# Altium footprint library WR-PHD_Socket Header.PcbLib: 279 footprints (part 10 of 18)
Each footprint in its own frame and in the unit in brackets; x right, y up, seen from the top. Pads: shape width x height; smd on the part's side, far side on the other; paste and mask are expansions set on the pad; w line width, h text height; cw(c..) or ccw(c..) is an arc to the next point about the centre after c.
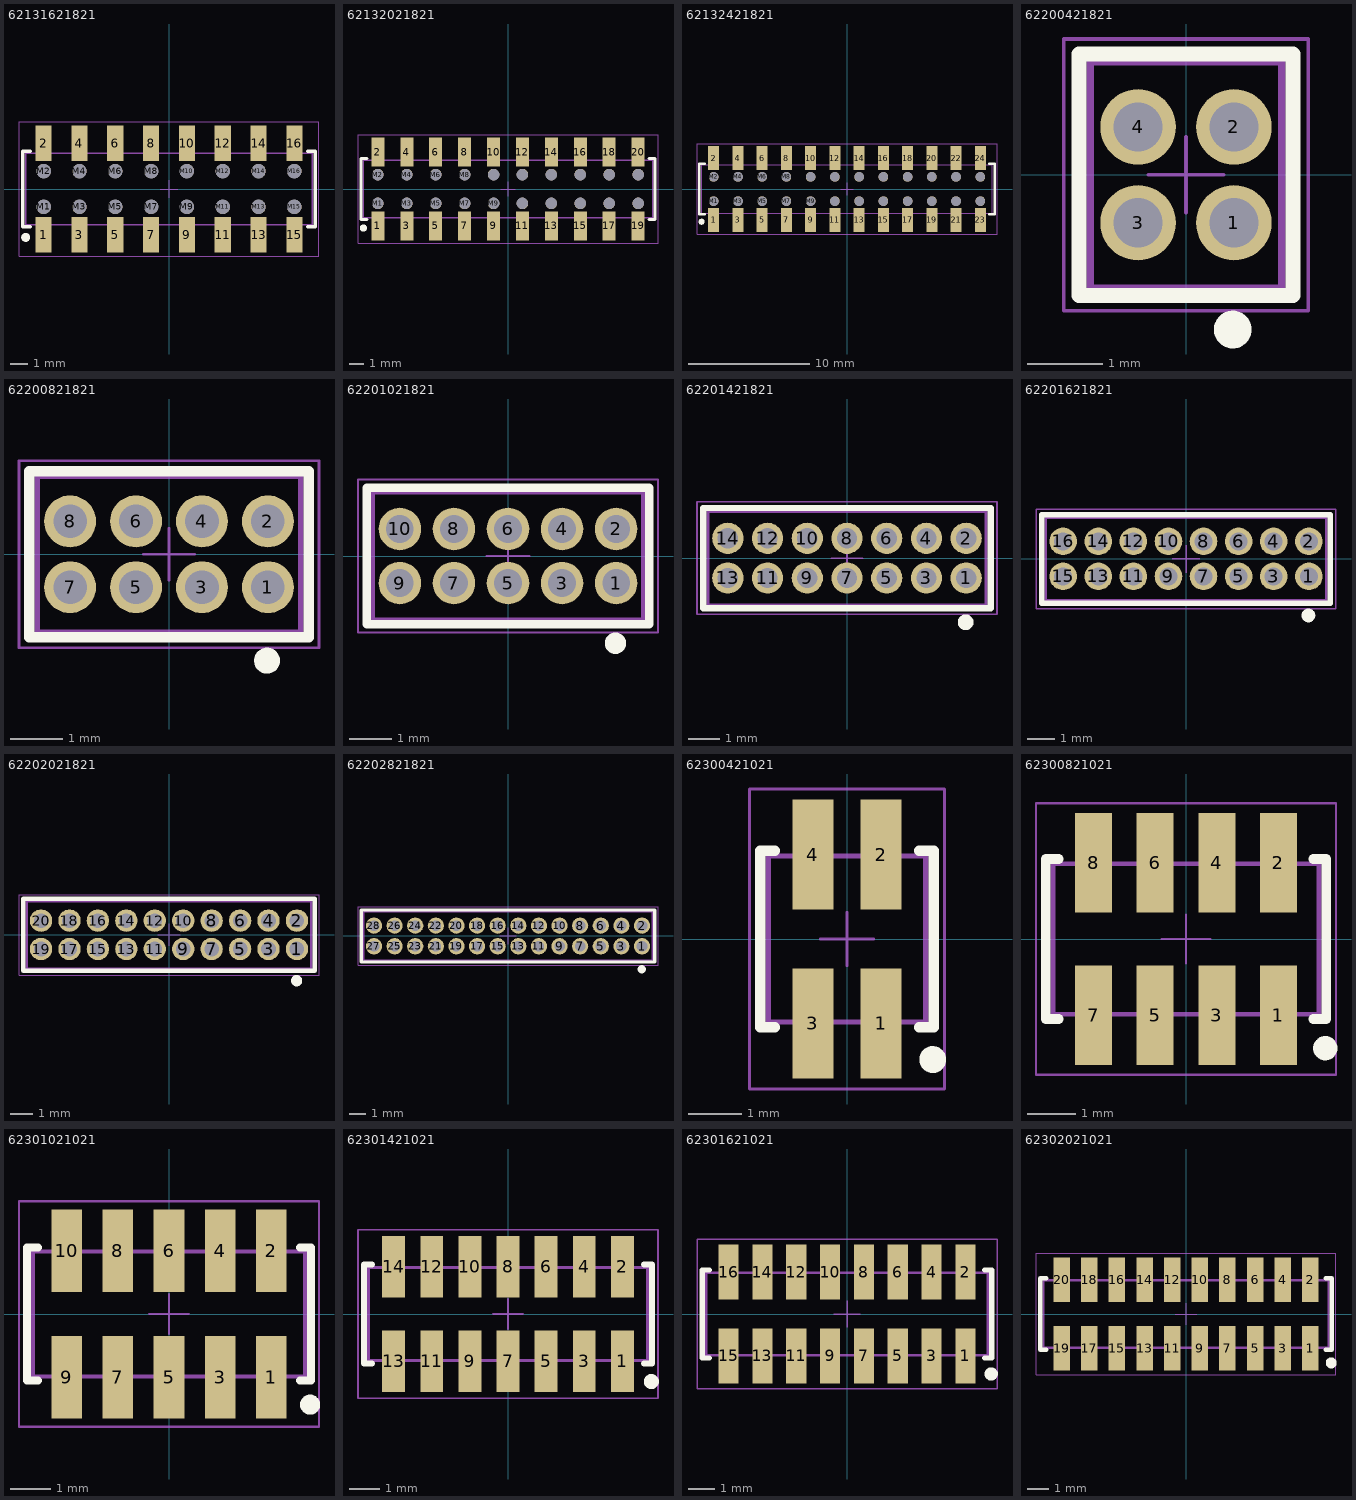
[diagram p9: the footprints below, top view; thin cyan lines are the x and y axes]

## 62131621821 [mm] "Socket Header, Pitch 2.00 mm, SMT, Vertical, dual row, 16p"
height 2.35
pads (32):
  rect 0.9x2 smd: 1(-7,-2.55) 2(-7,2.55) 3(-5,-2.55) 4(-5,2.55) 5(-3,-2.55) 6(-3,2.55) 7(-1,-2.55) 8(-1,2.55) 9(1,-2.55) 10(1,2.55) 11(3,-2.55) 12(3,2.55) 13(5,-2.55) 14(5,2.55) 15(7,-2.55) 16(7,2.55)
  round 0.8 hole 0.8 unplated: M1(-7,-1) M2(-7,1) M3(-5,-1) M4(-5,1) M5(-3,-1) M6(-3,1) M7(-1,-1) M8(-1,1) M9(1,-1) M10(1,1) M11(3,-1) M12(3,1) M13(5,-1) M14(5,1) M15(7,-1) M16(7,1)
Top Overlay:
  circle w0.25: c-8,-2.7 r0.125
  lines w0.2: -7.75,-2.1 -8.175,-2.1 -8.175,2.1 -7.75,2.1 ; 7.75,-2.1 8.175,-2.1 8.175,2.1 7.75,2.1
Top Designator:
  text ".Designator" at -4.998,-0.333 h1
Top Component Outline:
  lines w0.1: -7.25,-2 -7.25,-3 -6.75,-3 -6.75,-2 ; -7.25,2 -7.25,3 -6.75,3 -6.75,2 ; -5.25,-2 -5.25,-3 -4.75,-3 -4.75,-2 ; -5.25,2 -5.25,3 -4.75,3 -4.75,2 ; -3.25,-2 -3.25,-3 -2.75,-3 -2.75,-2 ; -3.25,2 -3.25,3 -2.75,3 -2.75,2 ; -1.25,-2 -1.25,-3 -0.75,-3 -0.75,-2 ; -1.25,2 -1.25,3 -0.75,3 -0.75,2 ; 0.75,-2 0.75,-3 1.25,-3 1.25,-2 ; 0.75,2 0.75,3 1.25,3 1.25,2 ; 2.75,-2 2.75,-3 3.25,-3 3.25,-2 ; 2.75,2 2.75,3 3.25,3 3.25,2 ; 4.75,-2 4.75,-3 5.25,-3 5.25,-2 ; 4.75,2 4.75,3 5.25,3 5.25,2 ; 6.75,-2 6.75,-3 7.25,-3 7.25,-2 ; 6.75,2 6.75,3 7.25,3 7.25,2 ; -8,-2 8,-2 8,2 -8,2 -8,-2
Top Courtyard:
  lines w0.05: -8.375,-3.75 8.375,-3.75 8.375,3.75 -8.375,3.75 -8.375,-3.75
Top Component Center:
  lines w0.05: -0.5,0 0.5,0 ; 0,-0.5 0,0.5
3D body "62131621821.stp": height 2.95, standoff 0, extent -8,-3 8,3

## 62132021821 [mm] "Socket Header, Pitch 2.00 mm, SMT, Vertical, dual row, 20p"
height 2.35
pads (40):
  rect 0.9x2 smd: 1(-9,-2.55) 2(-9,2.55) 3(-7,-2.55) 4(-7,2.55) 5(-5,-2.55) 6(-5,2.55) 7(-3,-2.55) 8(-3,2.55) 9(-1,-2.55) 10(-1,2.55) 11(1,-2.55) 12(1,2.55) 13(3,-2.55) 14(3,2.55) 15(5,-2.55) 16(5,2.55) 17(7,-2.55) 18(7,2.55) 19(9,-2.55) 20(9,2.55)
  round 0.8 hole 0.8 unplated: M1(-9,-1) M2(-9,1) M3(-7,-1) M4(-7,1) M5(-5,-1) M6(-5,1) M7(-3,-1) M8(-3,1) M9(-1,-1) M10(-1,1) M11(1,-1) M12(1,1) M13(3,-1) M14(3,1) M15(5,-1) M16(5,1) M17(7,-1) M18(7,1) M19(9,-1) M20(9,1)
Top Overlay:
  circle w0.25: c-10,-2.7 r0.125
  lines w0.2: -9.75,-2.1 -10.175,-2.1 -10.175,2.1 -9.75,2.1 ; 9.75,-2.1 10.175,-2.1 10.175,2.1 9.75,2.1
Top Designator:
  text ".Designator" at -4.998,-0.333 h1
Top Component Outline:
  lines w0.1: -9.25,-2 -9.25,-3 -8.75,-3 -8.75,-2 ; -9.25,2 -9.25,3 -8.75,3 -8.75,2 ; -7.25,-2 -7.25,-3 -6.75,-3 -6.75,-2 ; -7.25,2 -7.25,3 -6.75,3 -6.75,2 ; -5.25,-2 -5.25,-3 -4.75,-3 -4.75,-2 ; -5.25,2 -5.25,3 -4.75,3 -4.75,2 ; -3.25,-2 -3.25,-3 -2.75,-3 -2.75,-2 ; -3.25,2 -3.25,3 -2.75,3 -2.75,2 ; -1.25,-2 -1.25,-3 -0.75,-3 -0.75,-2 ; -1.25,2 -1.25,3 -0.75,3 -0.75,2 ; 0.75,-2 0.75,-3 1.25,-3 1.25,-2 ; 0.75,2 0.75,3 1.25,3 1.25,2 ; 2.75,-2 2.75,-3 3.25,-3 3.25,-2 ; 2.75,2 2.75,3 3.25,3 3.25,2 ; 4.75,-2 4.75,-3 5.25,-3 5.25,-2 ; 4.75,2 4.75,3 5.25,3 5.25,2 ; 6.75,-2 6.75,-3 7.25,-3 7.25,-2 ; 6.75,2 6.75,3 7.25,3 7.25,2 ; 8.75,-2 8.75,-3 9.25,-3 9.25,-2 ; 8.75,2 8.75,3 9.25,3 9.25,2 ; -10,-2 10,-2 10,2 -10,2 -10,-2
Top Courtyard:
  lines w0.05: -10.375,-3.75 10.375,-3.75 10.375,3.75 -10.375,3.75 -10.375,-3.75
Top Component Center:
  lines w0.05: -0.5,0 0.5,0 ; 0,-0.5 0,0.5
3D body "62132021821.stp": height 2.95, standoff 0, extent -10,-3 10,3

## 62132421821 [mm] "Socket Header, Pitch 2.00 mm, SMT, Vertical, dual row, 24p"
height 2.35
pads (48):
  rect 0.9x2 smd: 1(-11,-2.55) 2(-11,2.55) 3(-9,-2.55) 4(-9,2.55) 5(-7,-2.55) 6(-7,2.55) 7(-5,-2.55) 8(-5,2.55) 9(-3,-2.55) 10(-3,2.55) 11(-1,-2.55) 12(-1,2.55) 13(1,-2.55) 14(1,2.55) 15(3,-2.55) 16(3,2.55) 17(5,-2.55) 18(5,2.55) 19(7,-2.55) 20(7,2.55) 21(9,-2.55) 22(9,2.55) 23(11,-2.55) 24(11,2.55)
  round 0.8 hole 0.8 unplated: M1(-11,-1) M2(-11,1) M3(-9,-1) M4(-9,1) M5(-7,-1) M6(-7,1) M7(-5,-1) M8(-5,1) M9(-3,-1) M10(-3,1) M11(-1,-1) M12(-1,1) M13(1,-1) M14(1,1) M15(3,-1) M16(3,1) M17(5,-1) M18(5,1) M19(7,-1) M20(7,1) M21(9,-1) M22(9,1) M23(11,-1) M24(11,1)
Top Overlay:
  circle w0.25: c-12,-2.7 r0.125
  lines w0.2: -11.75,-2.1 -12.175,-2.1 -12.175,2.1 -11.75,2.1 ; 11.75,-2.1 12.175,-2.1 12.175,2.1 11.75,2.1
Top Designator:
  text ".Designator" at -4.998,-0.333 h1
Top Component Outline:
  lines w0.1: -11.25,-2 -11.25,-3 -10.75,-3 -10.75,-2 ; -11.25,2 -11.25,3 -10.75,3 -10.75,2 ; -9.25,-2 -9.25,-3 -8.75,-3 -8.75,-2 ; -9.25,2 -9.25,3 -8.75,3 -8.75,2 ; -7.25,-2 -7.25,-3 -6.75,-3 -6.75,-2 ; -7.25,2 -7.25,3 -6.75,3 -6.75,2 ; -5.25,-2 -5.25,-3 -4.75,-3 -4.75,-2 ; -5.25,2 -5.25,3 -4.75,3 -4.75,2 ; -3.25,-2 -3.25,-3 -2.75,-3 -2.75,-2 ; -3.25,2 -3.25,3 -2.75,3 -2.75,2 ; -1.25,-2 -1.25,-3 -0.75,-3 -0.75,-2 ; -1.25,2 -1.25,3 -0.75,3 -0.75,2 ; 0.75,-2 0.75,-3 1.25,-3 1.25,-2 ; 0.75,2 0.75,3 1.25,3 1.25,2 ; 2.75,-2 2.75,-3 3.25,-3 3.25,-2 ; 2.75,2 2.75,3 3.25,3 3.25,2 ; 4.75,-2 4.75,-3 5.25,-3 5.25,-2 ; 4.75,2 4.75,3 5.25,3 5.25,2 ; 6.75,-2 6.75,-3 7.25,-3 7.25,-2 ; 6.75,2 6.75,3 7.25,3 7.25,2 ; 8.75,-2 8.75,-3 9.25,-3 9.25,-2 ; 8.75,2 8.75,3 9.25,3 9.25,2 ; 10.75,-2 10.75,-3 11.25,-3 11.25,-2 ; 10.75,2 10.75,3 11.25,3 11.25,2 ; -12,-2 12,-2 12,2 -12,2 -12,-2
Top Courtyard:
  lines w0.05: -12.375,-3.75 12.375,-3.75 12.375,3.75 -12.375,3.75 -12.375,-3.75
Top Component Center:
  lines w0.05: -0.5,0 0.5,0 ; 0,-0.5 0,0.5
3D body "62132421821.stp": height 2.95, standoff 0, extent -12,-3 12,3

## 62200421821 [mm] "Socket Header, Pitch 1.27 mm, THT, Vertical, dual row, 4p"
height 4.65
pads (4):
  round 1 hole 0.65: 1(0.635,-0.635) 2(0.635,0.635) 3(-0.635,-0.635) 4(-0.635,0.635)
Top Overlay:
  circle w0.25: c0.62,-2.05 r0.125
  lines w0.2: -1.42,-1.6 -1.42,1.6 1.42,1.6 1.42,-1.6 -1.42,-1.6
Top Designator:
  text ".Designator" at -4.998,-0.333 h1
Top Component Outline:
  lines w0.1: -1.27,-1.5 1.27,-1.5 1.27,1.5 -1.27,1.5 -1.27,-1.5
Top Courtyard:
  lines w0.05: -1.62,-1.8 -1.62,1.8 1.62,1.8 1.62,-1.8 -1.62,-1.8
Top Component Center:
  lines w0.05: -0.5,0 0.5,0 ; 0,-0.5 0,0.5
3D body "62200421821.stp": height 4.55, standoff -2.15, extent -1.47,-1.5 1.47,1.5

## 62200821821 [mm] "Socket Header, Pitch 1.27 mm, THT, Vertical, dual row, 8p"
height 4.65
pads (8):
  round 1 hole 0.65: 1(1.905,-0.635) 2(1.905,0.635) 3(0.635,-0.635) 4(0.635,0.635) 5(-0.635,-0.635) 6(-0.635,0.635) 7(-1.905,-0.635) 8(-1.905,0.635)
Top Overlay:
  circle w0.25: c1.89,-2.05 r0.125
  lines w0.2: -2.69,-1.6 -2.69,1.6 2.69,1.6 2.69,-1.6 -2.69,-1.6
Top Designator:
  text ".Designator" at -4.998,-0.333 h1
Top Component Outline:
  lines w0.1: -2.54,-1.5 2.54,-1.5 2.54,1.5 -2.54,1.5 -2.54,-1.5
Top Courtyard:
  lines w0.05: -2.89,-1.8 -2.89,1.8 2.89,1.8 2.89,-1.8 -2.89,-1.8
Top Component Center:
  lines w0.05: -0.5,0 0.5,0 ; 0,-0.5 0,0.5
3D body "62200821821.stp": height 4.55, standoff -2.15, extent -2.74,-1.5 2.74,1.5

## 62201021821 [mm] "Socket Header, Pitch 1.27 mm, THT, Vertical, dual row, 10p"
height 4.65
pads (10):
  round 1 hole 0.65: 1(2.54,-0.635) 2(2.54,0.635) 3(1.27,-0.635) 4(1.27,0.635) 5(0,-0.635) 6(0,0.635) 7(-1.27,-0.635) 8(-1.27,0.635) 9(-2.54,-0.635) 10(-2.54,0.635)
Top Overlay:
  circle w0.25: c2.525,-2.05 r0.125
  lines w0.2: -3.325,-1.6 -3.325,1.6 3.325,1.6 3.325,-1.6 -3.325,-1.6
Top Designator:
  text ".Designator" at -4.998,-0.333 h1
Top Component Outline:
  lines w0.1: -3.175,-1.5 3.175,-1.5 3.175,1.5 -3.175,1.5 -3.175,-1.5
Top Courtyard:
  lines w0.05: -3.525,-1.8 -3.525,1.8 3.525,1.8 3.525,-1.8 -3.525,-1.8
Top Component Center:
  lines w0.05: -0.5,0 0.5,0 ; 0,-0.5 0,0.5
3D body "62201021821.stp": height 4.55, standoff -2.15, extent -3.375,-1.5 3.375,1.5

## 62201421821 [mm] "Socket Header, Pitch 1.27 mm, THT, Vertical, dual row, 14p"
height 4.65
pads (14):
  round 1 hole 0.65: 1(3.81,-0.635) 2(3.81,0.635) 3(2.54,-0.635) 4(2.54,0.635) 5(1.27,-0.635) 6(1.27,0.635) 7(0,-0.635) 8(0,0.635) 9(-1.27,-0.635) 10(-1.27,0.635) 11(-2.54,-0.635) 12(-2.54,0.635) 13(-3.81,-0.635) 14(-3.81,0.635)
Top Overlay:
  circle w0.25: c3.795,-2.05 r0.125
  lines w0.2: -4.595,-1.6 -4.595,1.6 4.595,1.6 4.595,-1.6 -4.595,-1.6
Top Designator:
  text ".Designator" at -4.998,-0.333 h1
Top Component Outline:
  lines w0.1: -4.445,-1.5 4.445,-1.5 4.445,1.5 -4.445,1.5 -4.445,-1.5
Top Courtyard:
  lines w0.05: -4.795,-1.8 -4.795,1.8 4.795,1.8 4.795,-1.8 -4.795,-1.8
Top Component Center:
  lines w0.05: -0.5,0 0.5,0 ; 0,-0.5 0,0.5
3D body "62201421821.stp": height 4.55, standoff -2.15, extent -4.645,-1.5 4.645,1.5

## 62201621821 [mm] "Socket Header, Pitch 1.27 mm, THT, Vertical, dual row, 16p"
height 4.65
pads (16):
  round 1 hole 0.65: 1(4.445,-0.635) 2(4.445,0.635) 3(3.175,-0.635) 4(3.175,0.635) 5(1.905,-0.635) 6(1.905,0.635) 7(0.635,-0.635) 8(0.635,0.635) 9(-0.635,-0.635) 10(-0.635,0.635) 11(-1.905,-0.635) 12(-1.905,0.635) 13(-3.175,-0.635) 14(-3.175,0.635) 15(-4.445,-0.635) 16(-4.445,0.635)
Top Overlay:
  circle w0.25: c4.43,-2.05 r0.125
  lines w0.2: -5.23,-1.6 -5.23,1.6 5.23,1.6 5.23,-1.6 -5.23,-1.6
Top Designator:
  text ".Designator" at -4.998,-0.333 h1
Top Component Outline:
  lines w0.1: -5.08,-1.5 5.08,-1.5 5.08,1.5 -5.08,1.5 -5.08,-1.5
Top Courtyard:
  lines w0.05: -5.43,-1.8 -5.43,1.8 5.43,1.8 5.43,-1.8 -5.43,-1.8
Top Component Center:
  lines w0.05: -0.5,0 0.5,0 ; 0,-0.5 0,0.5
3D body "62201621821.stp": height 4.55, standoff -2.15, extent -5.28,-1.5 5.28,1.5

## 62202021821 [mm] "Socket Header, Pitch 1.27 mm, THT, Vertical, dual row, 20p"
height 4.65
pads (20):
  round 1 hole 0.65: 1(5.715,-0.635) 2(5.715,0.635) 3(4.445,-0.635) 4(4.445,0.635) 5(3.175,-0.635) 6(3.175,0.635) 7(1.905,-0.635) 8(1.905,0.635) 9(0.635,-0.635) 10(0.635,0.635) 11(-0.635,-0.635) 12(-0.635,0.635) 13(-1.905,-0.635) 14(-1.905,0.635) 15(-3.175,-0.635) 16(-3.175,0.635) 17(-4.445,-0.635) 18(-4.445,0.635) 19(-5.715,-0.635) 20(-5.715,0.635)
Top Overlay:
  circle w0.25: c5.7,-2.05 r0.125
  lines w0.2: -6.5,-1.6 -6.5,1.6 6.5,1.6 6.5,-1.6 -6.5,-1.6
Top Designator:
  text ".Designator" at -4.998,-0.333 h1
Top Component Outline:
  lines w0.1: -6.35,-1.5 6.35,-1.5 6.35,1.5 -6.35,1.5 -6.35,-1.5
Top Courtyard:
  lines w0.05: -6.7,-1.8 -6.7,1.8 6.7,1.8 6.7,-1.8 -6.7,-1.8
Top Component Center:
  lines w0.05: -0.5,0 0.5,0 ; 0,-0.5 0,0.5
3D body "62202021821.stp": height 4.55, standoff -2.15, extent -6.55,-1.5 6.55,1.5

## 62202821821 [mm] "Socket Header, Pitch 1.27 mm, THT, Vertical, dual row, 28p"
height 4.65
pads (28):
  round 1 hole 0.65: 1(8.255,-0.635) 2(8.255,0.635) 3(6.985,-0.635) 4(6.985,0.635) 5(5.715,-0.635) 6(5.715,0.635) 7(4.445,-0.635) 8(4.445,0.635) 9(3.175,-0.635) 10(3.175,0.635) 11(1.905,-0.635) 12(1.905,0.635) 13(0.635,-0.635) 14(0.635,0.635) 15(-0.635,-0.635) 16(-0.635,0.635) 17(-1.905,-0.635) 18(-1.905,0.635) 19(-3.175,-0.635) 20(-3.175,0.635) 21(-4.445,-0.635) 22(-4.445,0.635) 23(-5.715,-0.635) 24(-5.715,0.635) 25(-6.985,-0.635) 26(-6.985,0.635) 27(-8.255,-0.635) 28(-8.255,0.635)
Top Overlay:
  circle w0.25: c8.24,-2.05 r0.125
  lines w0.2: -9.04,-1.6 -9.04,1.6 9.04,1.6 9.04,-1.6 -9.04,-1.6
Top Designator:
  text ".Designator" at -4.998,-0.333 h1
Top Component Outline:
  lines w0.1: -8.89,-1.5 8.89,-1.5 8.89,1.5 -8.89,1.5 -8.89,-1.5
Top Courtyard:
  lines w0.05: -9.24,-1.8 -9.24,1.8 9.24,1.8 9.24,-1.8 -9.24,-1.8
Top Component Center:
  lines w0.05: -0.5,0 0.5,0 ; 0,-0.5 0,0.5
3D body "62202821821.stp": height 4.55, standoff -2.15, extent -9.09,-1.5 9.09,1.5

## 62300421021 [mm] "Socket Header, Pitch 1.27 mm, SMT, Vertical, dual row, 4p"
height 4.7
pads (4):
  rect 0.76x2.05 smd: 1(0.635,-1.575) 2(0.635,1.575) 3(-0.635,-1.575) 4(-0.635,1.575)
Top Overlay:
  circle w0.25: c1.6,-2.25 r0.125
  lines w0.2: -1.35,-1.65 -1.62,-1.65 -1.62,1.65 -1.35,1.65 ; 1.35,-1.65 1.62,-1.65 1.62,1.65 1.35,1.65
Top Designator:
  text ".Designator" at -4.998,-0.333 h1
Top Component Outline:
  lines w0.1: -0.885,-1.55 -0.885,-2.3 -0.385,-2.3 -0.385,-1.55 ; -0.885,1.55 -0.885,2.3 -0.385,2.3 -0.385,1.55 ; 0.385,-1.55 0.385,-2.3 0.885,-2.3 0.885,-1.55 ; 0.385,1.55 0.385,2.3 0.885,2.3 0.885,1.55 ; -1.47,-1.55 1.47,-1.55 1.47,1.55 -1.47,1.55 -1.47,-1.55
Top Courtyard:
  lines w0.05: -1.82,-2.8 -1.82,2.8 1.82,2.8 1.82,-2.8 -1.82,-2.8
Top Component Center:
  lines w0.05: -0.5,0 0.5,0 ; 0,-0.5 0,0.5
3D body "62300421021.stp": height 4.6, standoff 0, extent -1.47,-2.299 1.47,2.299

## 62300821021 [mm] "Socket Header, Pitch 1.27 mm, SMT, Vertical, dual row, 8p"
height 4.7
pads (8):
  rect 0.76x2.05 smd: 1(1.905,-1.575) 2(1.905,1.575) 3(0.635,-1.575) 4(0.635,1.575) 5(-0.635,-1.575) 6(-0.635,1.575) 7(-1.905,-1.575) 8(-1.905,1.575)
Top Overlay:
  circle w0.25: c2.87,-2.25 r0.125
  lines w0.2: -2.62,-1.65 -2.89,-1.65 -2.89,1.65 -2.62,1.65 ; 2.62,-1.65 2.89,-1.65 2.89,1.65 2.62,1.65
Top Designator:
  text ".Designator" at -4.998,-0.333 h1
Top Component Outline:
  lines w0.1: -2.155,-1.55 -2.155,-2.3 -1.655,-2.3 -1.655,-1.55 ; -2.155,1.55 -2.155,2.3 -1.655,2.3 -1.655,1.55 ; -0.885,-1.55 -0.885,-2.3 -0.385,-2.3 -0.385,-1.55 ; -0.885,1.55 -0.885,2.3 -0.385,2.3 -0.385,1.55 ; 0.385,-1.55 0.385,-2.3 0.885,-2.3 0.885,-1.55 ; 0.385,1.55 0.385,2.3 0.885,2.3 0.885,1.55 ; 1.655,-1.55 1.655,-2.3 2.155,-2.3 2.155,-1.55 ; 1.655,1.55 1.655,2.3 2.155,2.3 2.155,1.55 ; -2.74,-1.55 2.74,-1.55 2.74,1.55 -2.74,1.55 -2.74,-1.55
Top Courtyard:
  lines w0.05: -3.09,-2.8 -3.09,2.8 3.09,2.8 3.09,-2.8 -3.09,-2.8
Top Component Center:
  lines w0.05: -0.5,0 0.5,0 ; 0,-0.5 0,0.5
3D body "62300821021.stp": height 4.6, standoff 0, extent -2.74,-2.299 2.74,2.299

## 62301021021 [mm] "Socket Header, Pitch 1.27 mm, SMT, Vertical, dual row, 10p"
height 4.7
pads (10):
  rect 0.76x2.05 smd: 1(2.54,-1.575) 2(2.54,1.575) 3(1.27,-1.575) 4(1.27,1.575) 5(0,-1.575) 6(0,1.575) 7(-1.27,-1.575) 8(-1.27,1.575) 9(-2.54,-1.575) 10(-2.54,1.575)
Top Overlay:
  circle w0.25: c3.505,-2.25 r0.125
  lines w0.2: -3.255,-1.65 -3.525,-1.65 -3.525,1.65 -3.255,1.65 ; 3.255,-1.65 3.525,-1.65 3.525,1.65 3.255,1.65
Top Designator:
  text ".Designator" at -4.998,-0.333 h1
Top Component Outline:
  lines w0.1: -2.79,-1.55 -2.79,-2.3 -2.29,-2.3 -2.29,-1.55 ; -2.79,1.55 -2.79,2.3 -2.29,2.3 -2.29,1.55 ; -1.52,-1.55 -1.52,-2.3 -1.02,-2.3 -1.02,-1.55 ; -1.52,1.55 -1.52,2.3 -1.02,2.3 -1.02,1.55 ; -0.25,-1.55 -0.25,-2.3 0.25,-2.3 0.25,-1.55 ; -0.25,1.55 -0.25,2.3 0.25,2.3 0.25,1.55 ; 1.02,-1.55 1.02,-2.3 1.52,-2.3 1.52,-1.55 ; 1.02,1.55 1.02,2.3 1.52,2.3 1.52,1.55 ; 2.29,-1.55 2.29,-2.3 2.79,-2.3 2.79,-1.55 ; 2.29,1.55 2.29,2.3 2.79,2.3 2.79,1.55 ; -3.375,-1.55 -3.375,1.55 3.375,1.55 3.375,-1.55 -3.375,-1.55
Top Courtyard:
  lines w0.05: -3.725,-2.8 3.725,-2.8 3.725,2.8 -3.725,2.8 -3.725,-2.8
Top Component Center:
  lines w0.05: -0.5,0 0.5,0 ; 0,-0.5 0,0.5
3D body "62301021021.stp": height 4.6, standoff 0, extent -3.375,-2.299 3.375,2.299

## 62301421021 [mm] "Socket Header, Pitch 1.27 mm, SMT, Vertical, dual row, 14p"
height 4.7
pads (14):
  rect 0.76x2.05 smd: 1(3.81,-1.575) 2(3.81,1.575) 3(2.54,-1.575) 4(2.54,1.575) 5(1.27,-1.575) 6(1.27,1.575) 7(0,-1.575) 8(0,1.575) 9(-1.27,-1.575) 10(-1.27,1.575) 11(-2.54,-1.575) 12(-2.54,1.575) 13(-3.81,-1.575) 14(-3.81,1.575)
Top Overlay:
  circle w0.25: c4.775,-2.25 r0.125
  lines w0.2: -4.525,-1.65 -4.795,-1.65 -4.795,1.65 -4.525,1.65 ; 4.525,-1.65 4.795,-1.65 4.795,1.65 4.525,1.65
Top Designator:
  text ".Designator" at -4.998,-0.333 h1
Top Component Outline:
  lines w0.1: -4.06,-1.55 -4.06,-2.3 -3.56,-2.3 -3.56,-1.55 ; -4.06,1.55 -4.06,2.3 -3.56,2.3 -3.56,1.55 ; -2.79,-1.55 -2.79,-2.3 -2.29,-2.3 -2.29,-1.55 ; -2.79,1.55 -2.79,2.3 -2.29,2.3 -2.29,1.55 ; -1.52,-1.55 -1.52,-2.3 -1.02,-2.3 -1.02,-1.55 ; -1.52,1.55 -1.52,2.3 -1.02,2.3 -1.02,1.55 ; -0.25,-1.55 -0.25,-2.3 0.25,-2.3 0.25,-1.55 ; -0.25,1.55 -0.25,2.3 0.25,2.3 0.25,1.55 ; 1.02,-1.55 1.02,-2.3 1.52,-2.3 1.52,-1.55 ; 1.02,1.55 1.02,2.3 1.52,2.3 1.52,1.55 ; 2.29,-1.55 2.29,-2.3 2.79,-2.3 2.79,-1.55 ; 2.29,1.55 2.29,2.3 2.79,2.3 2.79,1.55 ; 3.56,-1.55 3.56,-2.3 4.06,-2.3 4.06,-1.55 ; 3.56,1.55 3.56,2.3 4.06,2.3 4.06,1.55 ; -4.645,-1.55 -4.645,1.55 4.645,1.55 4.645,-1.55 -4.645,-1.55
Top Courtyard:
  lines w0.05: -4.995,-2.8 4.995,-2.8 4.995,2.8 -4.995,2.8 -4.995,-2.8
Top Component Center:
  lines w0.05: -0.5,0 0.5,0 ; 0,-0.5 0,0.5
3D body "62301421021.stp": height 4.6, standoff 0, extent -4.645,-2.299 4.645,2.299

## 62301621021 [mm] "Socket Header, Pitch 1.27 mm, SMT, Vertical, dual row, 16p"
height 4.7
pads (16):
  rect 0.76x2.05 smd: 1(4.445,-1.575) 2(4.445,1.575) 3(3.175,-1.575) 4(3.175,1.575) 5(1.905,-1.575) 6(1.905,1.575) 7(0.635,-1.575) 8(0.635,1.575) 9(-0.635,-1.575) 10(-0.635,1.575) 11(-1.905,-1.575) 12(-1.905,1.575) 13(-3.175,-1.575) 14(-3.175,1.575) 15(-4.445,-1.575) 16(-4.445,1.575)
Top Overlay:
  circle w0.25: c5.41,-2.25 r0.125
  lines w0.2: -5.16,-1.65 -5.43,-1.65 -5.43,1.65 -5.16,1.65 ; 5.16,-1.65 5.43,-1.65 5.43,1.65 5.16,1.65
Top Designator:
  text ".Designator" at -4.998,-0.333 h1
Top Component Outline:
  lines w0.1: -4.695,-1.55 -4.695,-2.3 -4.195,-2.3 -4.195,-1.55 ; -4.695,1.55 -4.695,2.3 -4.195,2.3 -4.195,1.55 ; -3.425,-1.55 -3.425,-2.3 -2.925,-2.3 -2.925,-1.55 ; -3.425,1.55 -3.425,2.3 -2.925,2.3 -2.925,1.55 ; -2.155,-1.55 -2.155,-2.3 -1.655,-2.3 -1.655,-1.55 ; -2.155,1.55 -2.155,2.3 -1.655,2.3 -1.655,1.55 ; -0.885,-1.55 -0.885,-2.3 -0.385,-2.3 -0.385,-1.55 ; -0.885,1.55 -0.885,2.3 -0.385,2.3 -0.385,1.55 ; 0.385,-1.55 0.385,-2.3 0.885,-2.3 0.885,-1.55 ; 0.385,1.55 0.385,2.3 0.885,2.3 0.885,1.55 ; 1.655,-1.55 1.655,-2.3 2.155,-2.3 2.155,-1.55 ; 1.655,1.55 1.655,2.3 2.155,2.3 2.155,1.55 ; 2.925,-1.55 2.925,-2.3 3.425,-2.3 3.425,-1.55 ; 2.925,1.55 2.925,2.3 3.425,2.3 3.425,1.55 ; 4.195,-1.55 4.195,-2.3 4.695,-2.3 4.695,-1.55 ; 4.195,1.55 4.195,2.3 4.695,2.3 4.695,1.55 ; -5.28,-1.55 5.28,-1.55 5.28,1.55 -5.28,1.55 -5.28,-1.55
Top Courtyard:
  lines w0.05: -5.63,-2.8 -5.63,2.8 5.63,2.8 5.63,-2.8 -5.63,-2.8
Top Component Center:
  lines w0.05: -0.5,0 0.5,0 ; 0,-0.5 0,0.5
3D body "62301621021.stp": height 4.6, standoff 0, extent -5.28,-2.299 5.28,2.299

## 62302021021 [mm] "Socket Header, Pitch 1.27 mm, SMT, Vertical, dual row, 20p"
height 4.7
pads (20):
  rect 0.76x2.05 smd: 1(5.715,-1.575) 2(5.715,1.575) 3(4.445,-1.575) 4(4.445,1.575) 5(3.175,-1.575) 6(3.175,1.575) 7(1.905,-1.575) 8(1.905,1.575) 9(0.635,-1.575) 10(0.635,1.575) 11(-0.635,-1.575) 12(-0.635,1.575) 13(-1.905,-1.575) 14(-1.905,1.575) 15(-3.175,-1.575) 16(-3.175,1.575) 17(-4.445,-1.575) 18(-4.445,1.575) 19(-5.715,-1.575) 20(-5.715,1.575)
Top Overlay:
  circle w0.25: c6.68,-2.25 r0.125
  lines w0.2: -6.43,-1.65 -6.7,-1.65 -6.7,1.65 -6.43,1.65 ; 6.43,-1.65 6.7,-1.65 6.7,1.65 6.43,1.65
Top Designator:
  text ".Designator" at -4.998,-0.333 h1
Top Component Outline:
  lines w0.1: -5.965,-1.55 -5.965,-2.3 -5.465,-2.3 -5.465,-1.55 ; -5.965,1.55 -5.965,2.3 -5.465,2.3 -5.465,1.55 ; -4.695,-1.55 -4.695,-2.3 -4.195,-2.3 -4.195,-1.55 ; -4.695,1.55 -4.695,2.3 -4.195,2.3 -4.195,1.55 ; -3.425,-1.55 -3.425,-2.3 -2.925,-2.3 -2.925,-1.55 ; -3.425,1.55 -3.425,2.3 -2.925,2.3 -2.925,1.55 ; -2.155,-1.55 -2.155,-2.3 -1.655,-2.3 -1.655,-1.55 ; -2.155,1.55 -2.155,2.3 -1.655,2.3 -1.655,1.55 ; -0.885,-1.55 -0.885,-2.3 -0.385,-2.3 -0.385,-1.55 ; -0.885,1.55 -0.885,2.3 -0.385,2.3 -0.385,1.55 ; 0.385,-1.55 0.385,-2.3 0.885,-2.3 0.885,-1.55 ; 0.385,1.55 0.385,2.3 0.885,2.3 0.885,1.55 ; 1.655,-1.55 1.655,-2.3 2.155,-2.3 2.155,-1.55 ; 1.655,1.55 1.655,2.3 2.155,2.3 2.155,1.55 ; 2.925,-1.55 2.925,-2.3 3.425,-2.3 3.425,-1.55 ; 2.925,1.55 2.925,2.3 3.425,2.3 3.425,1.55 ; 4.195,-1.55 4.195,-2.3 4.695,-2.3 4.695,-1.55 ; 4.195,1.55 4.195,2.3 4.695,2.3 4.695,1.55 ; 5.465,-1.55 5.465,-2.3 5.965,-2.3 5.965,-1.55 ; 5.465,1.55 5.465,2.3 5.965,2.3 5.965,1.55 ; -6.55,-1.55 6.55,-1.55 6.55,1.55 -6.55,1.55 -6.55,-1.55
Top Courtyard:
  lines w0.05: -6.9,-2.8 -6.9,2.8 6.9,2.8 6.9,-2.8 -6.9,-2.8
Top Component Center:
  lines w0.05: -0.5,0 0.5,0 ; 0,-0.5 0,0.5
3D body "62302021021.stp": height 4.6, standoff 0, extent -6.55,-2.299 6.55,2.299